# Altium footprint library FootPrintLib_8.PcbLib: 590 footprints (part 22 of 37)
Each footprint in its own frame and in the unit in brackets; x right, y up, seen from the top. Pads: shape width x height; smd on the part's side, far side on the other; paste and mask are expansions set on the pad; w line width, h text height; cw(c..) or ccw(c..) is an arc to the next point about the centre after c.
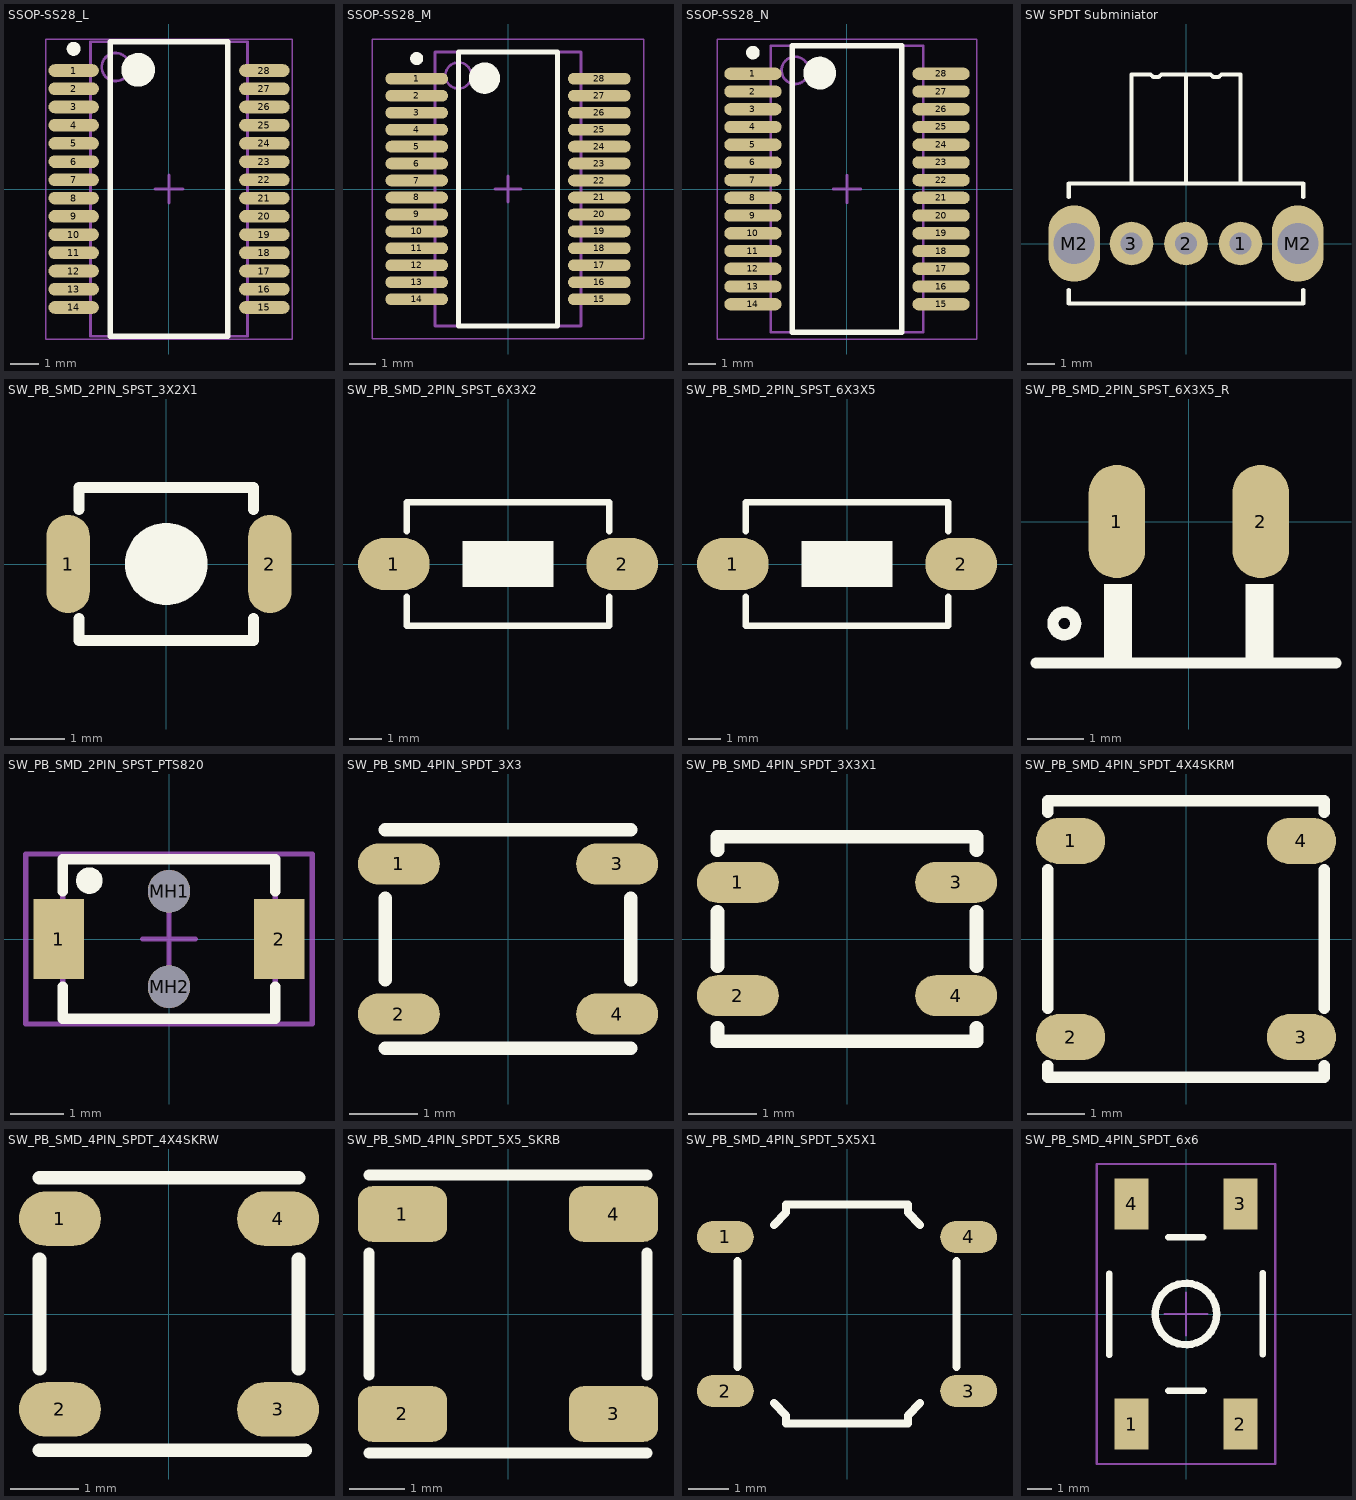
[diagram p21: the footprints below, top view; thin cyan lines are the x and y axes]

## SSOP-SS28_L [mm] "SOP, 28-Leads, Body 10.2x5.2mm, Pitch 0.65mm, IPC High Density"
height 2
pads (28):
  oval 1.8x0.45 smd: 1(-3.4,4.225) 2(-3.4,3.575) 3(-3.4,2.925) 4(-3.4,2.275) 5(-3.4,1.625) 6(-3.4,0.975) 7(-3.4,0.325) 8(-3.4,-0.325) 9(-3.4,-0.975) 10(-3.4,-1.625) 11(-3.4,-2.275) 12(-3.4,-2.925) 13(-3.4,-3.575) 14(-3.4,-4.225) 15(3.4,-4.225) 16(3.4,-3.575) 17(3.4,-2.925) 18(3.4,-2.275) 19(3.4,-1.625) 20(3.4,-0.975) 21(3.4,-0.325) 22(3.4,0.325) 23(3.4,0.975) 24(3.4,1.625) 25(3.4,2.275) 26(3.4,2.925) 27(3.4,3.575) 28(3.4,4.225)
Top Overlay:
  circle w0.6: c-1.1,4.25 r0.3
  circle w0.25: c-3.4,5 r0.125
  lines w0.2: -2.1,-5.25 2.1,-5.25 2.1,5.25 -2.1,5.25 -2.1,-5.25
Mechanical 13:
  circle w0.1: c-1.9,4.35 r0.5
  lines w0.1: -2.8,-5.25 2.8,-5.25 2.8,5.25 -2.8,5.25 -2.8,-5.25
Mechanical 15:
  lines w0.05: -4.4,-5.35 4.4,-5.35 4.4,5.35 -4.4,5.35 -4.4,-5.35
  lines w0.1: -0.5,0 0.5,0 ; 0,-0.5 0,0.5
3D body: height 2, standoff 0.05, extent -2.8,-5.25 2.8,5.25

## SSOP-SS28_M [mm] "SOP, 28-Leads, Body 10.2x5.2mm, Pitch 0.65mm, IPC Low Density"
height 2
pads (28):
  oval 2.4x0.45 smd: 1(-3.5,4.225) 2(-3.5,3.575) 3(-3.5,2.925) 4(-3.5,2.275) 5(-3.5,1.625) 6(-3.5,0.975) 7(-3.5,0.325) 8(-3.5,-0.325) 9(-3.5,-0.975) 10(-3.5,-1.625) 11(-3.5,-2.275) 12(-3.5,-2.925) 13(-3.5,-3.575) 14(-3.5,-4.225) 15(3.5,-4.225) 16(3.5,-3.575) 17(3.5,-2.925) 18(3.5,-2.275) 19(3.5,-1.625) 20(3.5,-0.975) 21(3.5,-0.325) 22(3.5,0.325) 23(3.5,0.975) 24(3.5,1.625) 25(3.5,2.275) 26(3.5,2.925) 27(3.5,3.575) 28(3.5,4.225)
Top Overlay:
  circle w0.25: c-3.5,5 r0.125
  circle w0.6: c-0.9,4.25 r0.3
  lines w0.2: -1.9,-5.25 -1.9,5.25 1.9,5.25 1.9,-5.25 -1.9,-5.25
Mechanical 13:
  circle w0.1: c-1.9,4.35 r0.5
  lines w0.1: -2.8,-5.25 -2.8,5.25 2.8,5.25 2.8,-5.25 -2.8,-5.25
Mechanical 15:
  lines w0.05: -5.2,-5.75 -5.2,5.75 5.2,5.75 5.2,-5.75 -5.2,-5.75
  lines w0.1: -0.5,0 0.5,0 ; 0,-0.5 0,0.5
3D body: height 2, standoff 0.05, extent -2.8,-5.25 2.8,5.25

## SSOP-SS28_N [mm] "SOP, 28-Leads, Body 10.2x5.2mm, Pitch 0.65mm, IPC Medium Density"
height 2
pads (28):
  oval 2.1x0.45 smd: 1(-3.45,4.225) 2(-3.45,3.575) 3(-3.45,2.925) 4(-3.45,2.275) 5(-3.45,1.625) 6(-3.45,0.975) 7(-3.45,0.325) 8(-3.45,-0.325) 9(-3.45,-0.975) 10(-3.45,-1.625) 11(-3.45,-2.275) 12(-3.45,-2.925) 13(-3.45,-3.575) 14(-3.45,-4.225) 15(3.45,-4.225) 16(3.45,-3.575) 17(3.45,-2.925) 18(3.45,-2.275) 19(3.45,-1.625) 20(3.45,-0.975) 21(3.45,-0.325) 22(3.45,0.325) 23(3.45,0.975) 24(3.45,1.625) 25(3.45,2.275) 26(3.45,2.925) 27(3.45,3.575) 28(3.45,4.225)
Top Overlay:
  circle w0.6: c-1,4.25 r0.3
  circle w0.25: c-3.45,5 r0.125
  lines w0.2: -2,-5.25 2,-5.25 2,5.25 -2,5.25 -2,-5.25
Mechanical 13:
  circle w0.1: c-1.9,4.35 r0.5
  lines w0.1: -2.8,-5.25 2.8,-5.25 2.8,5.25 -2.8,5.25 -2.8,-5.25
Mechanical 15:
  lines w0.05: -4.75,-5.5 4.75,-5.5 4.75,5.5 -4.75,5.5 -4.75,-5.5
  lines w0.1: -0.5,0 0.5,0 ; 0,-0.5 0,0.5
3D body: height 2, standoff 0.05, extent -2.8,-5.25 2.8,5.25

## SW SPDT Subminiator [mm] "Subminiator SPDT switch"
pads (5):
  round 1.6 hole 0.8: 1(2,0) 2(0,0) 3(-2,0)
  oval 1.9x2.8 hole 1.5: M2(-4.1,0) M2(4.1,0)
Top Overlay:
  lines w0.15: -4.3,-1.7 -4.3,-2.2 4.3,-2.2 4.3,-1.7 ; -4.3,1.7 -4.3,2.2 4.3,2.2 4.3,1.7 ; -2,2.2 -2,6.2 ; 0,2.2 0,6.2 ; 2,2.2 2,6.2 1.3,6.2 1.2,6.1 1,6.1 0.9,6.2 0,6.2 ; -2,6.2 -1.3,6.2 -1.2,6.1 -1,6.1 -0.9,6.2 0,6.2 ; -2,6.2 -2,6.2 ; 0,6.2 0,6.2 ; 0,6.2 0,6.2
3D body "User Library-CK_Slide.step": height 4.7, standoff -2.79, extent -4.311,-2.28 4.3,6.093

## SW_PB_SMD_2PIN_SPST_3X2X1 [mm] "SWITCH, PUSHBUTTON, SMD, SPST, 3X2.5mm"
height 1.2
pads (2):
  oval 0.8x1.8 smd mask+0.1: 1(-1.8,0) 2(1.9,0)
Top Overlay:
  region: -0.75,0 -0.75,0.074 -0.721,0.219 -0.665,0.355 -0.583,0.478 -0.478,0.583 -0.355,0.665 -0.219,0.721 -0.074,0.75 0,0.75 0.074,0.75 0.219,0.721 0.355,0.665 0.478,0.583 0.583,0.478 0.665,0.355 0.721,0.219 0.75,0.074 0.75,0 0.75,-0.074 0.721,-0.219 0.665,-0.355 0.583,-0.478 0.478,-0.583 0.355,-0.665 0.219,-0.721 0.074,-0.75 0,-0.75 -0.074,-0.75 -0.219,-0.721 -0.355,-0.665 -0.478,-0.583 -0.583,-0.478 -0.665,-0.355 -0.721,-0.219 -0.75,-0.074
  lines w0.2: -1.6,-1 -1.6,-1.4 1.6,-1.4 1.6,-1 ; -1.6,1 -1.6,1.4 1.6,1.4 1.6,1
3D body: height 1.6, standoff 1.2, extent -0.75,-0.75 0.75,0.75
3D body: height 0.1, standoff 0, extent 1.5,-0.7 2,0.7
3D body: height 0.1, standoff 0, extent -2,-0.7 -1.5,0.7
3D body: height 1.2, standoff 0, extent -1.5,-1.25 1.5,1.25

## SW_PB_SMD_2PIN_SPST_6X3X2 [mm] "SWITCH, PUSHBUTTON, SMD, SPST, 6X3.5X2.5mm, RS-282G05A3, SKQYPA, 50000 Cycles"
height 5
pads (2):
  oval 2.2x1.6 smd mask+0.1: 1(-3.5,0) 2(3.5,0)
Top Overlay:
  region: 1.4,0.7 -1.4,0.7 -1.4,-0.7 1.4,-0.7
  lines w0.2: -3.1,-1 -3.1,-1.9 3.1,-1.9 3.1,-1 ; -3.1,1 -3.1,1.9 3.1,1.9 3.1,1
3D body "SKQYPA_43452.stp": height 2.5, standoff 0, extent -3.397,-1.858 3.397,1.859

## SW_PB_SMD_2PIN_SPST_6X3X5 [mm] "SWITCH, PUSHBUTTON, SMD, SPST, 6X3.5mm, SKQMBBE010, 50000 Cycles, 1.57N Force"
height 5
pads (2):
  oval 2.2x1.6 smd mask+0.1: 1(-3.5,0) 2(3.5,0)
Top Overlay:
  region: 1.4,0.7 -1.4,0.7 -1.4,-0.7 1.4,-0.7
  lines w0.2: -3.1,-1 -3.1,-1.9 3.1,-1.9 3.1,-1 ; -3.1,1 -3.1,1.9 3.1,1.9 3.1,1
3D body "43685.stp": height 5, standoff 0, extent -3.649,-1.75 3.65,1.75

## SW_PB_SMD_2PIN_SPST_6X3X5_R [mm] "SWITCH, PUSHBUTTON, SMD, SPST, RIGHT"
pads (2):
  oval 1x2 smd mask+0.1: 1(-1.27,0) 2(1.27,0)
Top Overlay:
  circle w0.2: c-2.2,-1.8 r0.2
  rectangle: -1.5,-2.5 -1,-1.1
  region: 1.5,-1.1 1,-1.1 1,-2.5 1.5,-2.5
  lines w0.2: -2.7,-2.5 2.6,-2.5
3D body "43685.stp": height 3.55, standoff 0.05, extent -3.649,-5 3.65,0

## SW_PB_SMD_2PIN_SPST_PTS820 [mm] "SMT Tactile Switch PTS 820 Series"
height 2
pads (4):
  rect 0.95x1.5 smd: 1(-2.075,0) 2(2.075,0)
  round 0.8 hole 0.8 unplated: MH1(0,0.9) MH2(0,-0.9)
Top Overlay:
  circle w0.25: c-1.5,1.1 r0.125
  lines w0.2: -2,-0.9 -2,-1.5 2,-1.5 2,-0.9 ; -2,0.9 -2,1.5 2,1.5 2,0.9
Mechanical 13:
  lines w0.1: -2,-1.5 2,-1.5 2,1.5 -2,1.5 -2,-1.5
Mechanical 15:
  lines w0.1: -0.5,0 0.5,0 ; 0,-0.5 0,0.5 ; -2.7,-1.6 2.7,-1.6 2.7,1.6 -2.7,1.6 -2.7,-1.6
3D body "SMT Tactile Switch PTS-820.STEP": height 2.05, standoff -0.5, extent -2.25,-1.55 2.25,1.55

## SW_PB_SMD_4PIN_SPDT_3X3 [mm] "SWITCH, PUSHBUTTON, SMD, SPDT, 3.3x2.9 mm, SKSH Series; Height 0.38mm ; 200,000 cycles ; 1.6N Force, SKSHAAE010"
height 0.379
pads (4):
  oval 1.2x0.6 smd mask+0.1: 1(-1.6,1.1) 2(-1.6,-1.1) 3(1.6,1.1) 4(1.6,-1.1)
Top Overlay:
  lines w0.2: -1.8,-1.6 1.8,-1.6 ; -1.8,-0.6 -1.8,0.6 ; -1.8,1.6 1.8,1.6 ; 1.8,-0.6 1.8,0.6
3D body "SKSHAA.STEP": height 0.4, standoff 0.03, extent -1.716,-1.48 1.717,1.48

## SW_PB_SMD_4PIN_SPDT_3X3X1 [mm] "SWITCH, PUSHBUTTON, SMD, SPDT, 3.0x2.7mm, SKSG Series; Height 1.4 mm; 200,000 cycles; 4N force, SKSGAAE010"
height 1.4
pads (4):
  oval 1.2x0.6 smd mask+0.1: 1(-1.6,0.83) 2(-1.6,-0.83) 3(1.6,0.83) 4(1.6,-0.83)
Top Overlay:
  lines w0.2: -1.9,-1.3 -1.9,-1.5 1.9,-1.5 1.9,-1.3 ; -1.9,-0.4 -1.9,0.4 ; -1.9,1.3 -1.9,1.5 1.9,1.5 1.9,1.3 ; 1.9,-0.4 1.9,0.4
3D body "SKSGAA.STEP": height 1.4, standoff 0, extent -1.75,-1.387 1.75,1.387

## SW_PB_SMD_4PIN_SPDT_4X4SKRM [mm] "SWITCH, PUSHBUTTON, SMD, SPDT, SKRM Series ; Height 0.4 mm ; 500,000 cycles ; 1.57N Force, SKRMAAE010"
height 0.4
pads (4):
  oval 1.2x0.8 smd mask+0.1: 1(-2,1.7) 2(-2,-1.7) 3(2,-1.7) 4(2,1.7)
Top Overlay:
  lines w0.2: -2.4,-2.2 -2.4,-2.4 2.4,-2.4 2.4,-2.2 ; -2.4,-1.2 -2.4,1.2 ; -2.4,2.2 -2.4,2.4 2.4,2.4 2.4,2.2 ; 2.4,-1.2 2.4,1.2
3D body "SKRMAA.STEP": height 0.4, standoff 0, extent -2.25,-2.25 2.25,2.25

## SW_PB_SMD_4PIN_SPDT_4X4SKRW [mm] "SWITCH, PUSHBUTTON, SMD, SPDT, SKRW Series ; Height 0.35 mm ; 500,000 cycles ; 1.57N Force, SKRWAEE030"
height 0.35
pads (4):
  oval 1.2x0.8 smd mask+0.1: 1(-1.6,1.4) 2(-1.6,-1.4) 3(1.6,-1.4) 4(1.6,1.4)
Top Overlay:
  lines w0.2: -1.9,-2 2,-2 ; -1.9,-0.8 -1.9,0.8 ; -1.9,2 1.9,2 ; 1.9,-0.8 1.9,0.8
3D body "SKRWAE.STEP": height 0.38, standoff 0.03, extent -1.85,-1.85 1.85,1.85

## SW_PB_SMD_4PIN_SPDT_5X5_SKRB [mm] "SWITCH, PUSHBUTTON, SMD, SPDT, SKRB Series ; Height 0.55 mm ; 2,000,000 cycles ; 1.1N Force, SKRBAGE010"
height 0.55
pads (4):
  rrect50% 1.6x1 smd mask+0.1: 1(-1.9,1.8) 2(-1.9,-1.8) 3(1.9,-1.8) 4(1.9,1.8)
Top Overlay:
  lines w0.2: -2.5,-2.5 2.5,-2.5 ; -2.5,-1.1 -2.5,1.1 ; -2.5,2.5 2.5,2.5 ; 2.5,-1.1 2.5,1.1
3D body "SKRBAG.STEP": height 0.55, standoff 0, extent -2.4,-2.4 2.4,2.4

## SW_PB_SMD_4PIN_SPDT_5X5X1 [mm] "SWITCH, PUSHBUTTON, SMD, SPDT, SKQG Series ; Height 1.5 mm ; 500,000 cycles ; 0.98N Force, SKQGAFE010"
height 1.5
pads (4):
  oval 1.4x0.8 smd mask+0.1: 1(-3,1.9) 2(-3,-1.9) 3(3,-1.9) 4(3,1.9)
Top Overlay:
  lines w0.2: -2.7,-1.3 -2.7,1.3 ; -1.8,-2.2 -1.5,-2.5 -1.5,-2.7 1.5,-2.7 1.5,-2.5 1.8,-2.2 ; -1.8,2.2 -1.5,2.5 -1.5,2.7 1.5,2.7 1.5,2.5 1.8,2.2 ; 2.7,-1.3 2.7,1.3
3D body "SKQGAF.STEP": height 1.53, standoff 0.03, extent -3.2,-2.6 3.2,2.6

## SW_PB_SMD_4PIN_SPDT_6x6 [mm] "Miniature Push Button Switch,B3F Series;body 6 x 6mm, 4-Leads"
height 5.4
pads (4):
  rect 1.4x2.1 smd: 1(-2.25,-4.55) 2(2.25,-4.55) 3(2.25,4.55) 4(-2.25,4.55)
Top Overlay:
  circle w0.305: c0,0 r1.27
  lines w0.254: -3.175,-1.702 -3.175,1.676 ; -0.737,-3.175 0.737,-3.175 ; -0.737,3.175 0.711,3.175 ; 3.175,-1.676 3.175,1.702
Mechanical 15:
  lines w0.1: -0.889,0 0,0 ; 0,-0.889 0,0 ; 0,0.889 0,0 ; 0.889,0 0,0 ; -3.683,-6.2 3.683,-6.2 3.683,6.2 -3.683,6.2 -3.683,-6.2
3D body "User Library-TS-1143S-WP.step": height 4.3, standoff 0, extent -3.21,-4.053 3.29,3.947